# Altium schematic symbol library Tactile.SchLib: 1 symbol
Pins are listed as number, name and electrical type; pins without a type are passive.

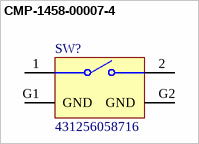
[diagram p0: symbol CMP-1458-00007-4]

## CMP-1458-00007-4
designator SW?, comment 431256058716
Tactile Switch, 0.05A, 12Vdc, 160Gf, Tht Rohs Compliant: Yes |Wurth Elektronik 431256058716; Illumination Type: Non-Illuminated; Voltage Rating: 12V; Insulation Resistance: 100MΩ; Switch Function: Off-Mom; Throw Configuration: SPST; Actuator Material: Liquid Crystal Polymer, Polymer; Current Rating: 50mA; Switch Travel: 250µm; Mechanical Life: 200kcycles; Diameter: 3mm; Packaging: Bulk; RoHS: Compliant; Min Operating Temperature: -40°C; Termination: PC Pin; Contact Plating: Silver; Max Operating Temperature: 85°C; Height: 5.85mm
footprint 4312560587x6 (6x6mm right angle Tact Switch with ground terminal, THT version)
pins: 1, 2, G1 GND, G2 GND